# Altium footprint library PcbLib1.PcbLib: 9 footprints
Each footprint in its own frame and in the unit in brackets; x right, y up, seen from the top. Pads: shape width x height; smd on the part's side, far side on the other; paste and mask are expansions set on the pad; w line width, h text height; cw(c..) or ccw(c..) is an arc to the next point about the centre after c.
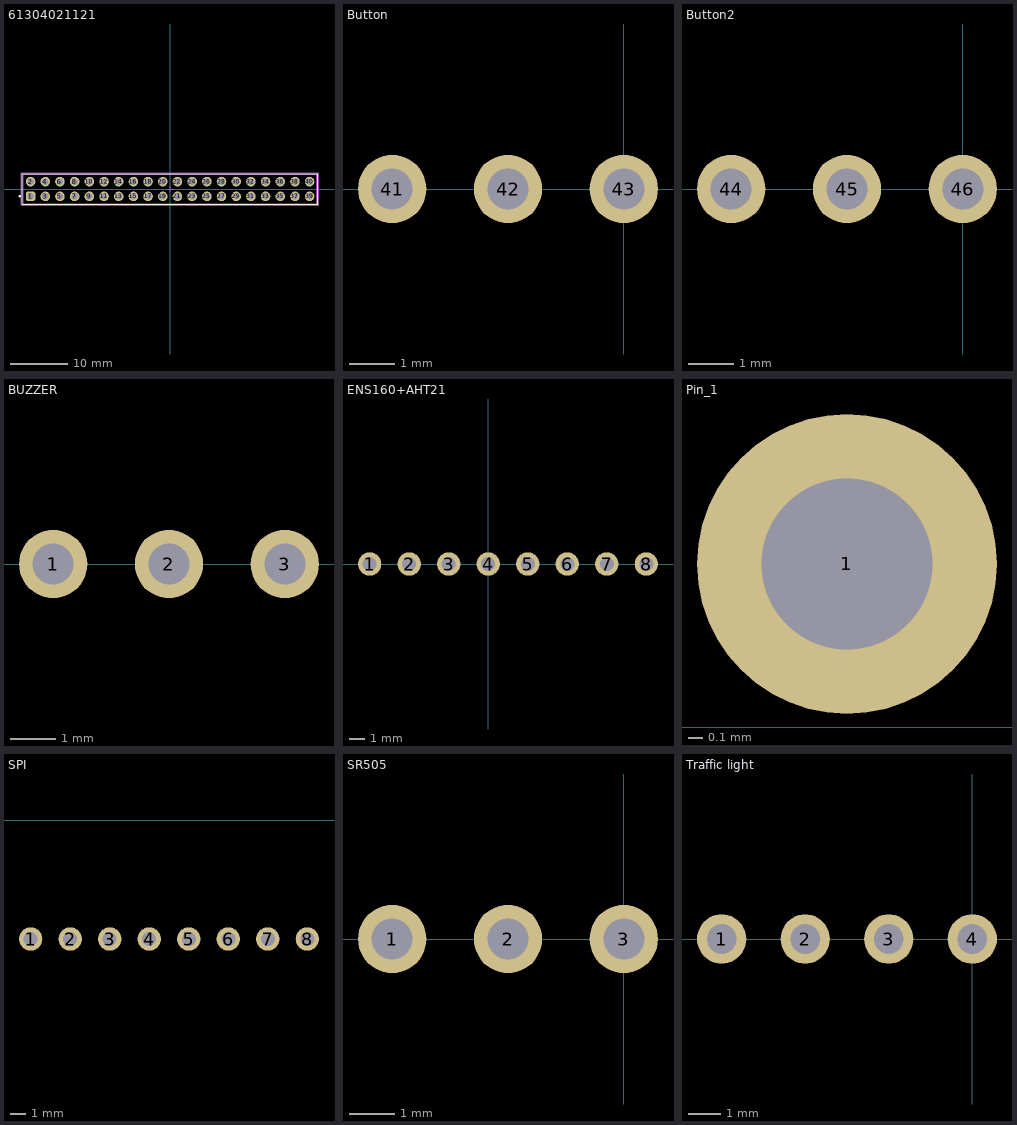
[diagram p0: the footprints below, top view; thin cyan lines are the x and y axes]

## 61304021121 [mm] "Pin Header, pitch 2.54 mm, THT, Vertical, dual row, 40p"
height 8.54
pads (40):
  rrect50% 1.65x1.65 hole 1.1: 1(-24.13,-1.27)
  round 1.65 hole 1.1: 2(-24.13,1.27) 3(-21.59,-1.27) 4(-21.59,1.27) 5(-19.05,-1.27) 6(-19.05,1.27) 7(-16.51,-1.27) 8(-16.51,1.27) 9(-13.97,-1.27) 10(-13.97,1.27) 11(-11.43,-1.27) 12(-11.43,1.27) 13(-8.89,-1.27) 14(-8.89,1.27) 15(-6.35,-1.27) 16(-6.35,1.27) 17(-3.81,-1.27) 18(-3.81,1.27) 19(-1.27,-1.27) 20(-1.27,1.27) 21(1.27,-1.27) 22(1.27,1.27) 23(3.81,-1.27) 24(3.81,1.27) 25(6.35,-1.27) 26(6.35,1.27) 27(8.89,-1.27) 28(8.89,1.27) 29(11.43,-1.27) 30(11.43,1.27) 31(13.97,-1.27) 32(13.97,1.27) 33(16.51,-1.27) 34(16.51,1.27) 35(19.05,-1.27) 36(19.05,1.27) 37(21.59,-1.27) 38(21.59,1.27) 39(24.13,-1.27) 40(24.13,1.27)
Top Overlay:
  circle w0.25: c-26.01,-1.25 r0.125
  lines w0.2: -25.55,-2.615 -25.55,2.615 25.55,2.615 25.55,-2.615 -25.55,-2.615
Top Courtyard:
  lines w0.05: -25.75,-2.815 25.75,-2.815 25.75,2.815 -25.75,2.815 -25.75,-2.815
Top Designator:
  text ".Designator" at -7.498,-0.5 h1.5
Top Component Outline:
  lines w0.1: -25.4,-2.54 -25.4,2.54 25.4,2.54 25.4,-2.54 -25.4,-2.54
Top Component Center:
  lines w0.05: -0.5,0 0.5,0 ; 0,-0.5 0,0.5
3D body "61304021121.stp": height 4.27, standoff -7.27, extent -25.476,-2.718 25.324,2.362

## Button [mm]
pads (3):
  round 1.5 hole 0.9: 41(-5.08,0) 42(-2.54,0) 43(0,0)
3D body "keyes digital switch.stp": height 17.86, standoff -5.7, extent -10.265,-4.233 5.235,4.267

## Button2 [mm]
pads (3):
  round 1.5 hole 0.9: 44(-5.08,0) 45(-2.54,0) 46(0,0)
3D body "keyes digital switch.stp": height 17.86, standoff -5.7, extent -10.265,-4.233 5.235,4.267

## BUZZER [mm]
pads (3):
  round 1.5 hole 0.9: 1(-38.1,0) 2(-35.56,0) 3(-33.02,0)
3D body "Buzzer Module - FC-07.stp": height 29.97, standoff -6.58, extent -42.11,-5.366 -29.01,9.634

## ENS160+AHT21 [mm]
pads (8):
  round 1.5 hole 0.9: 1(-7.62,0) 2(-5.08,0) 3(-2.54,0) 4(0,0) 5(2.54,0) 6(5.08,0) 7(7.62,0) 8(10.16,0)
3D body "Ens160+AHT21 CC811.step": height 2.44, standoff -0.6, extent -10.667,-1.554 13.333,17.746

## Pin_1 [mm]
pads (1):
  round 2.1 hole 1.2: 1(-2.794,1.143)

## SPI [mm]
pads (8):
  round 1.5 hole 0.9: 1(-825.5,-7.62) 2(-822.96,-7.62) 3(-820.42,-7.62) 4(-817.88,-7.62) 5(-815.34,-7.62) 6(-812.8,-7.62) 7(-810.26,-7.62) 8(-807.72,-7.62)
3D body "PCB - Modulo.step": height 59.2, standoff -6.11, extent -836.437,-7.929 -796.987,0.221

## SR505 [mm]
pads (3):
  round 1.5 hole 0.9: 1(-5.08,0) 2(-2.54,0) 3(0,0)
3D body "hc sr505 movement sensor.stp": height 32.86, standoff -6.99, extent -8.267,-10.28 2.933,0.882

## Traffic light [mm]
pads (4):
  round 1.5 hole 0.9: 1(-7.62,0) 2(-5.08,0) 3(-2.54,0) 4(0,0)
3D body "Traffic Light Module for Arduino and ESP32.step": height 55.4, standoff -7.06, extent -14.651,-7.781 6.929,5.506